# Altium schematic symbol library Diode%.SchLib: 376 symbols (part 6 of 9)
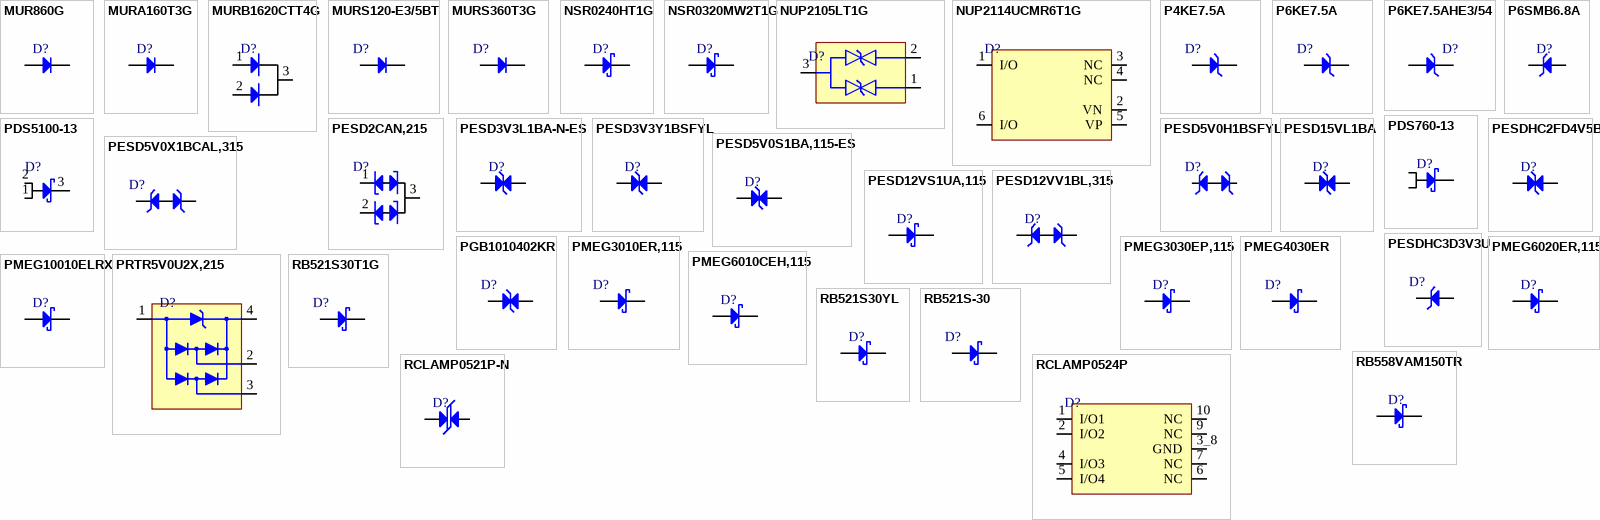
[diagram p14: symbols MUR860G to RCLAMP0524P]

## NUP2114UCMR6T1G
designator D?
TVS DIODE 5VWM 10VC 6TSOP; Manufacturer: onsemi; Manufacturer Part Number: NUP2114UCMR6T1G; Manufacturer Lifecycle Status: ACTIVE; Item Type: TVS Diodes; Breakdown Voltage: 7.5V; Value: 1pF; Clamping Voltage: 12V; Direction: Unidirectional; Element Configuration: Single; ESD Protection: Yes; Leakage Current: 1µA; Max Surge Current: 19A; Min Breakdown Voltage: 6V; Number of Bidirectional Channels: 2; Number of Channels: 1; Operating Supply Voltage: 5V; Peak Pulse Current: 8A; Test Current: 1mA; Supplier: DigiKey; LCSC Part Number: C393373; RoHS: Compliant; Stock: 34630; Pricing: 1=0.81, 10=0.5, 100=0.3234, 500=0.24708, 1000=0.22246 (USD); Case/Package: TSOP; China RoHS: Compliant; Contact Plating: Tin; Depth: 1.5mm; Halogen Free: Halogen Free; Height: 1mm; Lead Free: Lead Free; Length: 3mm; Lifecycle Status: Production; Max Breakdown Voltage: 7.5V; Max Operating Temperature: 125°C; Max Reverse Leakage Current: 1µA; Min Operating Temperature: -40°C; Number of Elements: 1; Number of Lines: 2; Pins: 6; Number of Terminals: 6; Packaging: Tape and Reel; Peak Reverse Current: 1µA; Polarity: Unidirectional; Power Line Protection: Yes; Radiation Hardening: No; REACH SVHC: Yes; Reverse Standoff Voltage: 5V; Schedule B: 8536300000, 8536300000|8536300000|8536300000|8536300000|8536300000|8536300000|8536300000|8536300000|8536300000|8536300000|8536300000|8536300000|8536300000|8536300000|8536300000|8536300000|8536300000|8536300000|8536300000|8536300000|8536300000|8536300000|8536300000|85; Width: 1.7mm; Working Voltage: 5V; ComponentLink1URL: https://datasheet.octopart.com:443/NUP2114UCMR6T1G-onsemi-datasheet-180968601.pdf?src-supplier=IHS; ComponentLink1Description: https://datasheet.octopart.com:443/NUP2114UCMR6T1G-onsemi-datasheet-180968601.pdf?src-supplier=IHS; ComponentLink2URL: https://datasheet.octopart.com:443/NUP2114UCMR6T1G-ON-Semiconductor-datasheet-139013348.pdf?src-supplier=Upverter; ComponentLink2Description: https://datasheet.octopart.com:443/NUP2114UCMR6T1G-ON-Semiconductor-datasheet-139013348.pdf?src-supplier=Upverter; ComponentLink3URL: https://datasheet.octopart.com:443/NUP2114UCMR6T1G-ON-Semiconductor-datasheet-12517220.pdf?src-supplier=JRH+Electronics; ComponentLink3Description: https://datasheet.octopart.com:443/NUP2114UCMR6T1G-ON-Semiconductor-datasheet-12517220.pdf?src-supplier=JRH+Electronics; ComponentLink4URL: https://datasheet.octopart.com:443/NUP2114UCMR6T1G-ON-Semiconductor-datasheet-93402670.pdf?src-supplier=Newark; ComponentLink4Description: https://datasheet.octopart.com:443/NUP2114UCMR6T1G-ON-Semiconductor-datasheet-93402670.pdf?src-supplier=Newark; ComponentLink5URL: https://datasheet.octopart.com:443/NUP2114UCMR6T1G-ON-Semiconductor-datasheet-11781058.pdf?src-supplier=Arrow+Electronics; ComponentLink5Description: https://datasheet.octopart.com:443/NUP2114UCMR6T1G-ON-Semiconductor-datasheet-11781058.pdf?src-supplier=Arrow+Electronics; ComponentLink6URL: http://sigma.octopart.com:80/15540786/rohs_certificate/ON-Semiconductor-NUP2114UCMR6T1G.pdf?src-supplier=Compliance+Statements; ComponentLink6Description: http://sigma.octopart.com:80/15540786/rohs_certificate/ON-Semiconductor-NUP2114UCMR6T1G.pdf?src-supplier=Compliance+Statements; ComponentLink7URL: http://sigma.octopart.com:80/15684254/materials_sheet/ON-Semiconductor-NUP2114UCMR6T1G.csv?src-supplier=Compliance+Statements; ComponentLink7Description: http://sigma.octopart.com:80/15684254/materials_sheet/ON-Semiconductor-NUP2114UCMR6T1G.csv?src-supplier=Compliance+Statements; ComponentLink8URL: http://sigma.octopart.com:80/150629776/rohs_statement/ON-Semiconductor-NUP2114UCMR6T1G.pdf?src-supplier=Compliance+Statements; ComponentLink8Description: http://sigma.octopart.com:80/150629776/rohs_statement/ON-Semiconductor-NUP2114UCMR6T1G.pdf?src-supplier=Compliance+Statements; ComponentLink9URL: http://sigma.octopart.com:80/reach_statement/ON-Semiconductor-company-79.pdf?src-supplier=Compliance+Statements; ComponentLink9Description: http://sigma.octopart.com:80/reach_statement/ON-Semiconductor-company-79.pdf?src-supplier=Compliance+Statements; ComponentLink10URL: https://octopart.com:443/opatz8j6/c1?t=WHQR9uYdgpzj_1pscu76jQl6SgdNYEFCsB45f32wZZoFxCsQNnTKjjNsMYmP8-tNAzH3PllWfDzCrm21sm3O0yX6Z-53NNC5eFJr5XbJGHdORXd5PF3OOo3CImUBKNeQS3HmN9uPOWjBWXFdunIc45LQOJ5gn3633PacQX-_VlsFFggQuFkNQdU_reWhDfM_aJjhbu9NdAkiBle4rEQKmYnaoI-ZpXvRqCCi0hGZ9pE0dY1iMvStjDVJm3RbKYgavDmI8RSqtgWwHOO5VIrlYvErgV0U4ccu7WiifKCK2DwQWrnPYcBzCgFR9XOWz9r3-48fB14U1Lqb5JaFbo5XHNFFjMaufSDK6ZmMxG1n87oH0pc&src-supplier=Compliance+Statements; ComponentLink10Description: https://octopart.com:443/opatz8j6/c1?t=WHQR9uYdgpzj_1pscu76jQl6SgdNYEFCsB45f32wZZoFxCsQNnTKjjNsMYmP8-tNAzH3PllWfDzCrm21sm3O0yX6Z-53NNC5eFJr5XbJGHdORXd5PF3OOo3CImUBKNeQS3HmN9uPOWjBWXFdunIc45LQOJ5gn3633PacQX-_VlsFFggQuFkNQdU_reWhDfM_aJjhbu9NdAkiBle4rEQKmYnaoI-ZpXvRqCCi0hGZ9pE0dY1iMvStjDVJm3RbKYgavDmI8RSqtgWwHOO5VIrlYvErgV0U4ccu7WiifKCK2DwQWrnPYcBzCgFR9XOWz9r3-48fB14U1Lqb5JaFbo5XHNFFjMaufSDK6ZmMxG1n87oH0pc&src-supplier=Compliance+Statements; ComponentLink11URL: https://octopart.com:443/opatz8j6/c1?t=VqVTyc6VXqTBoXsnuoG7LjY3mp2KX-eKzPIkg7aySNunBFpm0IQnkmc826qVFZhglS6vaf-VvqwaWaROfS_iErSVq9YUUuVgokCDv5Vhxq2pu1cn-vrRw1TlcFDaGbodQB-atNY6UP6gD2sOO8NRAoQTemD37mLChF1Rt1bpz95WWhJ_wI0XqbdDN8V1Apvbq8ufNLXwMMdHk5jYglIDCz4WpJf5DoTt1BP_MBv-tXAye_NcKa095654jMt3sjm_6RuC2vVrkcCpfXNjjgvjYPsYUvKBiXeM6Xjzw9honyCE0JlgCVT7WXyyf_6oP9kIrOXlSICGvfIO1US9YbBHujA-CLkGpoYI906K6Xw-TlpUog&src-supplier=Compliance+Statements; ComponentLink11Description: https://octopart.com:443/opatz8j6/c1?t=VqVTyc6VXqTBoXsnuoG7LjY3mp2KX-eKzPIkg7aySNunBFpm0IQnkmc826qVFZhglS6vaf-VvqwaWaROfS_iErSVq9YUUuVgokCDv5Vhxq2pu1cn-vrRw1TlcFDaGbodQB-atNY6UP6gD2sOO8NRAoQTemD37mLChF1Rt1bpz95WWhJ_wI0XqbdDN8V1Apvbq8ufNLXwMMdHk5jYglIDCz4WpJf5DoTt1BP_MBv-tXAye_NcKa095654jMt3sjm_6RuC2vVrkcCpfXNjjgvjYPsYUvKBiXeM6Xjzw9honyCE0JlgCVT7WXyyf_6oP9kIrOXlSICGvfIO1US9YbBHujA-CLkGpoYI906K6Xw-TlpUog&src-supplier=Compliance+Statements
footprint 6-TSOP
pins: 1 I/O, 2 VN, 3 NC, 4 NC, 5 VP, 6 I/O

## P4KE7.5A
designator D?
TVS DO15 6.4V 400W UNIDIR; Manufacturer: Littelfuse; Manufacturer Part Number: P4KE7.5A; Supplier: Digi-Key; Supplier Part Number: P4KE7.5ACT-ND; RoHS: Yes; Category: TVS Diodes; Stock: 4193; Pricing: 1=0.48, 10=0.371, 100=0.2228, 500=0.2063, 1000=0.14028, 2000=0.12914 (USD); ComponentLink1URL: https://datasheet.ciiva.com/342/littelfuse-tvs-diode-p4ke-datasheet-pdf-342184.pdf?src-supplier=Digi-Key; ComponentLink1Description: https://datasheet.ciiva.com/342/littelfuse-tvs-diode-p4ke-datasheet-pdf-342184.pdf?src-supplier=Digi-Key; ComponentLink2URL: https://datasheet.ciiva.com/342/littelfuse-tvs-diode-p4ke-datasheet-pdf-342185.pdf?src-supplier=Digi-Key; ComponentLink2Description: https://datasheet.ciiva.com/342/littelfuse-tvs-diode-p4ke-datasheet-pdf-342185.pdf?src-supplier=Digi-Key; ComponentLink3URL: https://datasheet.ciiva.com/344/littelfuse-tvs-diode-p4ke-datasheet-pdf-344098.pdf?src-supplier=Digi-Key; ComponentLink3Description: https://datasheet.ciiva.com/344/littelfuse-tvs-diode-p4ke-datasheet-pdf-344098.pdf?src-supplier=Digi-Key
footprint P4KE7.5A
pins: 1 K, 2 A

## P6KE7.5A
designator D?
TVS DIODE 6.4VWM 11.3VC DO204AC; Manufacturer: Littelfuse; Manufacturer Part Number: P6KE7.5A; Reverse Voltage: 6.4V; Supplier: Future Electronics; Supplier Part Number: 9017454; RoHS: Yes; Category: TVS Diodes; Stock: 2812; Pricing: 1=0.395, 15=0.325, 100=0.27, 400=0.235, 2000=0.189 (USD); ComponentLink1URL: https://datasheet.ciiva.com/15143/getdatasheetpartid-152329-15143807.pdf?src-supplier=Verical; ComponentLink1Description: https://datasheet.ciiva.com/15143/getdatasheetpartid-152329-15143807.pdf?src-supplier=Verical; ComponentLink2URL: https://datasheet.ciiva.com/331/littelfuse-tvs-diode-p6ke-datasheet-pdf-331007.pdf?src-supplier=Digi-Key; ComponentLink2Description: https://datasheet.ciiva.com/331/littelfuse-tvs-diode-p6ke-datasheet-pdf-331007.pdf?src-supplier=Digi-Key; ComponentLink3URL: https://datasheet.ciiva.com/331/littelfuse-tvs-diode-p6ke-datasheet-pdf-331031.pdf?src-supplier=Digi-Key; ComponentLink3Description: https://datasheet.ciiva.com/331/littelfuse-tvs-diode-p6ke-datasheet-pdf-331031.pdf?src-supplier=Digi-Key; ComponentLink4URL: https://datasheet.ciiva.com/331/littelfuse-tvs-diode-p6ke-datasheet-pdf-331032.pdf?src-supplier=Digi-Key; ComponentLink4Description: https://datasheet.ciiva.com/331/littelfuse-tvs-diode-p6ke-datasheet-pdf-331032.pdf?src-supplier=Digi-Key; ComponentLink5URL: https://datasheet.ciiva.com/4510/littelfuse-tvs-diode-p6ke-48586-4510890.pdf?src-supplier=Mouser; ComponentLink5Description: https://datasheet.ciiva.com/4510/littelfuse-tvs-diode-p6ke-48586-4510890.pdf?src-supplier=Mouser; ComponentLink6URL: https://datasheet.ciiva.com/8062/littelfuse-tvs-diode-p6ke-8062215.pdf?src-supplier=Element14; ComponentLink6Description: https://datasheet.ciiva.com/8062/littelfuse-tvs-diode-p6ke-8062215.pdf?src-supplier=Element14; LCSC Part Number: C1975000; Item Type: Diode
footprint DO-15
pins: 1 K, 2 A

## P6KE7.5AHE3/54
designator D?
TVS DIODE 6.4VWM 11.3VC DO204AC; Reverse Standoff Voltage: 6.4V; Peak Pulse Power: 600W; Min Breakdown Voltage: 7.13V; Peak Pulse Current: 53.1A; Diode Type: ZENER; Number of Unidirectional Channels: 1; Power Line Protection: No; Direction: Unidirectional; Max Surge Current: 100A; Clamping Voltage: 11.3V; Max Reverse Leakage Current: 1uA; Test Current: 1mA; Item Type: TVS Diode; ComponentLink1Description: LCSC; Supplier: Digi-Key; Supplier Part Number: P6KE7.5AHE3/54-ND; RoHS: Yes; Category: TVS Diodes; Pricing: 4000=0.21589, 8000=0.20453, 12000=0.18938, 28000=0.1875 (USD); Mounting Technology: Through Hole; Case/Package: DO-204AC; Pins: 2; Min Operating Temperature: -55°C; Max Operating Temperature: 175°C; Packaging: Tape and Reel; Series: Automotive, AEC-Q101, TransZorb®; Package Quantity: 4000; Operating Supply Voltage: 6.4V; Polarity: Unidirectional; Breakdown Voltage: 7.13V; Number of Channels: 1; Mounting Style: AXIAL; Termination: Axial; RoHS Compliant: Yes; ComponentLink2URL: https://datasheet.ciiva.com/346/p6ke-346272.pdf?src-supplier=Digi-Key; ComponentLink2Description: https://datasheet.ciiva.com/346/p6ke-346272.pdf?src-supplier=Digi-Key; ComponentLink3URL: https://datasheet.ciiva.com/346/p6ke-346468.pdf?src-supplier=Digi-Key; ComponentLink3Description: https://datasheet.ciiva.com/346/p6ke-346468.pdf?src-supplier=Digi-Key
footprint DO-15
pins: 1 K, 2 A

## P6SMB6.8A
designator D?
58.1A 600W 10.5V@58.1A 6.45V Unidirectional 5.8V SMB Electrostatic and Surge Protection (TVS/ESD) ROHS; Manufacturer: BORN; Manufacturer Part Number: P6SMB6.8A; Package: SMB; LCSC Part Number: C5439947; Item Type: TVS/ESD; ComponentLink1Description: LCSC; ComponentLink1URL: https://www.lcsc.com/product-detail/Electrostatic-and-Surge-Protection-TVS-ESD_BORN-P6SMB6-8A_C5439947.html
footprint SMB_
pins: 1 A, 2 C

## PDS760-13
designator D?
DIODE SCHOTTKY 60V 7A POWERDI5; Manufacturer: Diodes; Manufacturer Part Number: PDS760-13; Supplier: Future Electronics; Supplier Part Number: 7738990; RoHS: No; Category: Rectifier Diodes; Stock: 295000; Pricing: 5000=0.31, 10000=0.305, 15000=0.3, 20000=0.3 (USD); Reverse Voltage: 60V; ComponentLink1URL: https://datasheet.ciiva.com/4715/ds30477-62081-4715698.pdf?src-supplier=Mouser; ComponentLink1Description: https://datasheet.ciiva.com/4715/ds30477-62081-4715698.pdf?src-supplier=Mouser; ComponentLink2URL: https://datasheet.ciiva.com/915/ds30477-915170.pdf?src-supplier=Digikey; ComponentLink2Description: https://datasheet.ciiva.com/915/ds30477-915170.pdf?src-supplier=Digikey; ComponentLink3URL: https://datasheet.ciiva.com/16475/ds30477-16475660.pdf?src-supplier=Future+Electronics; ComponentLink3Description: https://datasheet.ciiva.com/16475/ds30477-16475660.pdf?src-supplier=Future+Electronics; ComponentLink4URL: https://datasheet.ciiva.com/7964/ds30477-7964294.pdf?src-supplier=Element14; ComponentLink4Description: https://datasheet.ciiva.com/7964/ds30477-7964294.pdf?src-supplier=Element14; ComponentLink5URL: https://datasheet.ciiva.com/8301/ds30477-8301047.pdf?src-supplier=Avnet; ComponentLink5Description: https://datasheet.ciiva.com/8301/ds30477-8301047.pdf?src-supplier=Avnet; ComponentLink6URL: https://datasheet.ciiva.com/8301/ds30477-8301849.pdf?src-supplier=Avnet; ComponentLink6Description: https://datasheet.ciiva.com/8301/ds30477-8301849.pdf?src-supplier=Avnet; ComponentLink7URL: https://datasheet.ciiva.com/915/ds30477-915171.pdf?src-supplier=Digikey; ComponentLink7Description: https://datasheet.ciiva.com/915/ds30477-915171.pdf?src-supplier=Digikey; ComponentLink8URL: https://datasheet.ciiva.com/915/ds30477-915172.pdf?src-supplier=Digikey; ComponentLink8Description: https://datasheet.ciiva.com/915/ds30477-915172.pdf?src-supplier=Digikey; LCSC Part Number: C96113; Item Type: Diode
footprint Power-DI-5
pins: 1 A, 2 A, 3 K

## PDS5100-13
designator D?
DIODE SCHOTTKY 100V 5A POWERDI5; Manufacturer: Diodes; Manufacturer Part Number: PDS5100-13; Supplier: Future Electronics; Supplier Part Number: 7587892; RoHS: Yes; Item Type: Diode; Stock: 15000; Pricing: 5000=0.51, 10000=0.49 (USD); ComponentLink1URL: https://datasheet.ciiva.com/4715/ds30483-85202-4715621.pdf?src-supplier=Mouser; ComponentLink1Description: https://datasheet.ciiva.com/4715/ds30483-85202-4715621.pdf?src-supplier=Mouser; ComponentLink2URL: https://datasheet.ciiva.com/23710/ds30483-23710529.pdf?src-supplier=Newark; ComponentLink2Description: https://datasheet.ciiva.com/23710/ds30483-23710529.pdf?src-supplier=Newark; ComponentLink3URL: https://datasheet.ciiva.com/8301/ds30483-8301032.pdf?src-supplier=Avnet; ComponentLink3Description: https://datasheet.ciiva.com/8301/ds30483-8301032.pdf?src-supplier=Avnet; ComponentLink4URL: https://datasheet.ciiva.com/8301/ds30483-8301036.pdf?src-supplier=Avnet; ComponentLink4Description: https://datasheet.ciiva.com/8301/ds30483-8301036.pdf?src-supplier=Avnet; ComponentLink5URL: https://datasheet.ciiva.com/915/ds30483-915146.pdf?src-supplier=Digikey; ComponentLink5Description: https://datasheet.ciiva.com/915/ds30483-915146.pdf?src-supplier=Digikey; ComponentLink6URL: https://datasheet.ciiva.com/915/ds30483-915147.pdf?src-supplier=Digikey; ComponentLink6Description: https://datasheet.ciiva.com/915/ds30483-915147.pdf?src-supplier=Digikey; ComponentLink7URL: https://datasheet.ciiva.com/915/ds30483-915148.pdf?src-supplier=Digikey; ComponentLink7Description: https://datasheet.ciiva.com/915/ds30483-915148.pdf?src-supplier=Digikey
footprint Power-DI-5
pins: 1 A, 2 A, 3 K

## PESD2CAN,215
designator D?
TVS DIODE 24VWM 41VC TO236AB; Manufacturer: Nexperia; Manufacturer Part Number: PESD2CAN,215; Supplier 1: Arrow Electronics; RoHS: No; Category: ESD and Circuit Protection ICs; Stock 1: 775; Pricing 1: 1=0.48690, 10=0.40120, 25=0.38650, 50=0.33780, 100=0.25440, 250=0.25380, 500=0.25120 (USD); ComponentLink1URL: http://www.farnell.com/datasheets/1750978.pdf?src-supplier=Farnell; ComponentLink1Description: http://www.farnell.com/datasheets/1750978.pdf?src-supplier=Farnell; ComponentLink2URL: https://assets.nexperia.com/documents/data-sheet/PESD2CAN.pdf?src-supplier=Digi-Key; ComponentLink2Description: https://assets.nexperia.com/documents/data-sheet/PESD2CAN.pdf?src-supplier=Digi-Key; ComponentLink3URL: http://www.farnell.com/datasheets/1750978.pdf?src-supplier=Newark; ComponentLink3Description: http://www.farnell.com/datasheets/1750978.pdf?src-supplier=Newark; Supplier Part Number 1: PESD2CAN,215; LCSC Part Number: C75176
footprint SOT-23 (TRANS NPN 40V 0.6A SOT23)
pins: 1 K1, 2 K2, 3 C_K

## PESD3V3L1BA-N-ES
designator D?
30A 360W 7V 3.5V Bidirectional 3.3V SOD-323 ESD and Surge Protection (TVS/ESD) ROHS; Manufacturer: ElecSuper; Manufacturer Part Number: PESD3V3L1BA-N-ES; Item Type: ESD/TVS; Package: SOD-323; LCSC Part Number: C41409249; ComponentLink1Description: LCSC; ComponentLink1URL: https://www.lcsc.com/product-detail/ESD-and-Surge-Protection-TVS-ESD_ElecSuper-PESD3V3L1BA-N-ES_C41409249.html
footprint SOD-323 (Bi-directional)
pins: 1 A, 2 A

## PESD3V3Y1BSFYL
designator D?
TVS DIODE 3.3VWM 3.7VC DSN0603-2; Manufacturer: Nexperia; Manufacturer Part Number: PESD3V3Y1BSFYL; Item Type: TVS Diodes; Supplier: Future Electronics; Supplier Part Number: 9101291; RoHS: No; Stock: 9000; Pricing: 9000=0.0488, 18000=0.0477, 36000=0.0466, 45000=0.0463, 135000=0.0442 (USD); ComponentLink1URL: http://www.farnell.com/datasheets/2621606.pdf?src-supplier=Farnell; ComponentLink1Description: http://www.farnell.com/datasheets/2621606.pdf?src-supplier=Farnell; ComponentLink2URL: http://www.farnell.com/datasheets/2621606.pdf?src-supplier=Newark; ComponentLink2Description: http://www.farnell.com/datasheets/2621606.pdf?src-supplier=Newark; LCSC Part Number: C552535
footprint DSN0603-2
pins: 1 A, 2 A

## PESD5V0H1BSFYL
designator D?
TVS DIODE 5VWM 6.3VC DSN0603-2; Manufacturer: Nexperia; Manufacturer Part Number: PESD5V0H1BSFYL; Supplier 1: Avnet; RoHS: Yes; Category: ESD and Circuit Protection ICs; Stock 1: 9000; Pricing 1: 18000=0.06453, 36000=0.06278, 54000=0.06104, 90000=0.05930, 180000=0.05755, 900000=0.05581, 1800000=0.05406 (USD); RoHS Compliant: Yes; ComponentLink1URL: http://www.farnell.com/datasheets/1961312.pdf?src-supplier=Farnell; ComponentLink1Description: http://www.farnell.com/datasheets/1961312.pdf?src-supplier=Farnell; ComponentLink2URL: https://assets.nexperia.com/documents/data-sheet/PESD5V0H1BSF.pdf?src-supplier=Digi-Key; ComponentLink2Description: https://assets.nexperia.com/documents/data-sheet/PESD5V0H1BSF.pdf?src-supplier=Digi-Key; ComponentLink3URL: http://www.farnell.com/datasheets/1961312.pdf?src-supplier=Newark; ComponentLink3Description: http://www.farnell.com/datasheets/1961312.pdf?src-supplier=Newark; Supplier Part Number 1: PESD5V0H1BSFYL; LCSC Part Number: C477989; Item Type: Diode
footprint DSN0603-2
pins: 1, 2

## PESD5V0S1BA,115-ES
designator D?
18A 250W 8V 5.5V Bidirectional 5V SOD-323 ESD and Surge Protection (TVS/ESD) ROHS; Manufacturer: ElecSuper; Manufacturer Part Number: PESD5V0S1BA,115-ES; Item Type: ESD/TVS; Package: SOD-323; LCSC Part Number: C41409246; ComponentLink1Description: LCSC; ComponentLink1URL: https://www.lcsc.com/product-detail/ESD-and-Surge-Protection-TVS-ESD_ElecSuper-PESD5V0S1BA-115-ES_C41409246.html
footprint SOD-323 (Bi-directional)
pins: 1 A, 2 A

## PESD5V0X1BCAL,315
designator D?
TVS DIODE 5.5VWM 17VC SOD882; Manufacturer: Nexperia; Manufacturer Part Number: PESD5V0X1BCAL,315; Supplier 1: Avnet; RoHS: Yes; Category: ESD and Circuit Protection ICs; Stock 1: 1519000; Pricing 1: 7463=0.04958, 7500=0.04824, 15000=0.04690, 38000=0.04556, 75000=0.04422, 380000=0.04288, 750000=0.04154 (USD); RoHS Compliant: Yes; ComponentLink1URL: https://assets.nexperia.com/documents/data-sheet/PESD5V0X1BCAL.pdf?src-supplier=Digi-Key; ComponentLink1Description: https://assets.nexperia.com/documents/data-sheet/PESD5V0X1BCAL.pdf?src-supplier=Digi-Key; Supplier Part Number 1: PESD5V0X1BCAL,315; LCSC Part Number: C456151; Item Type: Diode
footprint SOD-882
pins: 1, 2

## PESD12VS1UA,115
designator D?
TVS DIODE 12VWM 27VC SOD323; Manufacturer: Nexperia; Manufacturer Part Number: PESD12VS1UA,115; Supplier 1: Mouser; RoHS: Yes; Category: ESD and Circuit Protection ICs; Stock 1: 44616; Pricing 1: 1=0.47000, 10=0.34800, 50=0.34800, 100=0.19600, 1000=0.10300, 10000=0.07400 (USD); RoHS Compliant: Yes; ComponentLink1URL: http://www.farnell.com/datasheets/1508356.pdf?src-supplier=Farnell; ComponentLink1Description: http://www.farnell.com/datasheets/1508356.pdf?src-supplier=Farnell; Supplier Part Number 1: 771-PESD12S1UA115; LCSC Part Number: C131084; Item Type: TVS Diode
footprint SOD-323
pins: 1 A, 2 K

## PESD12VV1BL,315
designator D?
TVS DIODE 12VWM 38VC DFN1006-2; Manufacturer: Nexperia; Manufacturer Part Number: PESD12VV1BL,315; Polarity: 211Direction; Value: 25pF; Number of Channels: 1NUMBER; Min Breakdown Voltage: 14.6V; Peak Pulse Current: 7.8A; Peak Pulse Power: 290W; Power Line Protection: 5898YesNo; Reverse Standoff Voltage: 12V; Clamping Voltage: 38V; Element Configuration: 5460ElementConfiguration; Leakage Current: 10nA; Supplier: Future Electronics; LCSC Part Number: C111472; RoHS: Yes; Item Type: Diode; Stock: 70000; Pricing: 10000=0.029, 30000=0.028, 40000=0.0277, 100000=0.0269, 150000=0.0261 (USD); Mounting Technology: 8Mount; Case/Package: 111Case; Pins: 2NUMBER; Min Operating Temperature: -55°C; Max Operating Temperature: 150°C; Termination: 4890ConnectorType; Number of Bidirectional Channels: 1NUMBER; Working Voltage: 12V; Direction: 211Direction; Breakdown Voltage: 14.6V; Max Power Dissipation: 290W; Length: 1.02mm; Depth: 620um; Radiation Hardening: 5898YesNo; ComponentLink1URL: http://www.farnell.com/datasheets/2178732.pdf?src-supplier=Farnell; ComponentLink1Description: http://www.farnell.com/datasheets/2178732.pdf?src-supplier=Farnell; ComponentLink2URL: https://assets.nexperia.com/documents/data-sheet/PESD12VV1BL.pdf?src-supplier=Digikey; ComponentLink2Description: https://assets.nexperia.com/documents/data-sheet/PESD12VV1BL.pdf?src-supplier=Digikey
footprint DFN1006-2L (Bi-Directional)
pins: 1, 2

## PESD15VL1BA
designator D?
18A 5V 4V Bi-Directional 5V SOD-323 Electrostatic and Surge Protection (TVS/ESD) ROHS; Manufacturer: HXY MOSFET; Manufacturer Part Number: PESD15VL1BA; Package: SOD-323; LCSC Part Number: C5337178; Item Type: TVS/ESD; ComponentLink1Description: LCSC; ComponentLink1URL: https://www.lcsc.com/product-detail/Electrostatic-and-Surge-Protection-TVS-ESD_HXY-MOSFET-PESD15VL1BA_C5337178.html
footprint SOD-323 (Bi-directional)
pins: 1 A, 2 A

## PESDHC2FD4V5B
designator D?
12V 30A 4.5V Bi-Directional DFN1006 ESD Protection Devices ROHS; Manufacturer: Shanghai Prisemi Elec; Manufacturer Part Number: PESDHC2FD4V5B; Item Type: Diode; Package: DFN1006; LCSC Part Number: C110686; ComponentLink1Description: LCSC; ComponentLink1URL: https://www.lcsc.com/product-detail/ESD-Protection-Devices_Shanghai-Prisemi-Elec-PESDHC2FD4V5B_C110686.html
footprint DFN1006-2L_
pins: 1 A, 2 A

## PESDHC3D3V3U
designator D?
15A@8/20us 9V 5V 3.3V Unidirectional SOD-323 TVS ROHS; Manufacturer: Shanghai Prisemi Elec; Manufacturer Part Number: PESDHC3D3V3U; Item Type: Diode; Package: SOD-323; LCSC Part Number: C496538; ComponentLink1Description: LCSC; ComponentLink1URL: https://www.lcsc.com/product-detail/TVS_Shanghai-Prisemi-Elec-PESDHC3D3V3U_C496538.html
footprint SOD-323
pins: 1 C, 2 A

## PGB1010402KR
designator D?
TVS DIODE 12VWM 250VC 0402; Manufacturer: Littelfuse; Manufacturer Part Number: PGB1010402KR; Direction: Bidirectional; Capacitance: 0.04pF; Number of Channels: 1; Reverse Standoff Voltage: 12V; Clamping Voltage: 250V; Power Line Protection: No; Leakage Current: 1nA; Element Configuration: Single; Diode Type: ZENER; Response Time: 1ns; Supplier 1: Arrow Electronics; RoHS: Yes; Category: TVS Diodes; Stock 1: 30000; Pricing 1: 10000=0.23580, 20000=0.23350, 30000=0.23120, 40000=0.22890, 50000=0.21590, 100000=0.20590 (USD); Mount: Surface Mount; Case/Package: 0402; Number of Pins: 2; Case Code (Metric): 1005; Case Code (Imperial): 0402; Min Operating Temperature: -65°C; Max Operating Temperature: 125°C; Packaging: Cut Tape; Number of Bidirectional Channels: 1; Termination: SMD/SMT; Working Voltage: 12V; Operating Supply Voltage: 12V; Resistor Type: Zener; Series: PulseGuard® PGB; Voltage Rating: 12V; Polarity: Bidirectional; Number of Elements: 1; Voltage Rating (DC): 12V; Length: 1.66mm; Height: 0.31mm; Depth: 0.51mm; Radiation Hardening: No; Lead Free: Lead Free; RoHS Compliant: Yes; Reach SVHC Compliant: Yes; ComponentLink1URL: https://datasheet.ciiva.com/1268/1486684-1268416.pdf?src-supplier=Element14; ComponentLink1Description: https://datasheet.ciiva.com/1268/1486684-1268416.pdf?src-supplier=Element14; ComponentLink2URL: https://datasheet.ciiva.com/5837/575761-5837954.pdf?src-supplier=Farnell; ComponentLink2Description: https://datasheet.ciiva.com/5837/575761-5837954.pdf?src-supplier=Farnell; ComponentLink3URL: https://datasheet.ciiva.com/11804/0900766b80f9ec73-11804302.pdf?src-supplier=RSComponents; ComponentLink3Description: https://datasheet.ciiva.com/11804/0900766b80f9ec73-11804302.pdf?src-supplier=RSComponents; ComponentLink4URL: https://datasheet.ciiva.com/1268/575761-1268268.pdf?src-supplier=Element14; ComponentLink4Description: https://datasheet.ciiva.com/1268/575761-1268268.pdf?src-supplier=Element14; ComponentLink5URL: https://datasheet.ciiva.com/331/littelfuse-pulseguard-esd-pgb1-331746.pdf?src-supplier=Digi-Key; ComponentLink5Description: https://datasheet.ciiva.com/331/littelfuse-pulseguard-esd-pgb1-331746.pdf?src-supplier=Digi-Key; ComponentLink6URL: https://datasheet.ciiva.com/331/littelfuse-pulseguard-esd-pgb1-331747.pdf?src-supplier=Digi-Key; ComponentLink6Description: https://datasheet.ciiva.com/331/littelfuse-pulseguard-esd-pgb1-331747.pdf?src-supplier=Digi-Key; ComponentLink7URL: https://datasheet.ciiva.com/331/littelfuse-pulseguard-esd-pgb1-331745.pdf?src-supplier=Digi-Key; ComponentLink7Description: https://datasheet.ciiva.com/331/littelfuse-pulseguard-esd-pgb1-331745.pdf?src-supplier=Digi-Key; ComponentLink8URL: https://datasheet.ciiva.com/26917/getdatasheetpartid-250436-26917930.pdf?src-supplier=Verical; ComponentLink8Description: https://datasheet.ciiva.com/26917/getdatasheetpartid-250436-26917930.pdf?src-supplier=Verical; Supplier Part Number 1: PGB1010402KR; LCSC Part Number: C10676; Item Type: Diode
footprint Diode 0402
pins: 1 A, 2 A

## PMEG3010ER,115
designator D?
DIODE SCHOTTKY 30V 1A SOD123W; Manufacturer: Nexperia; Manufacturer Part Number: PMEG3010ER,115; Supplier 1: Digi-Key; Stock 1: 72983; Pricing 1: 1=0.35, 10=0.282, 25=0.258, 100=0.162, 250=0.1602, 500=0.15, 1000=0.102 (USD); Supplier Part Number 1: 1727-5201-1-ND; LCSC Part Number: C456106
footprint SOD-123W (DIODE SCHOTTKY 30V 1A SOD123W)
pins: 1 A, 2 K

## PMEG3030EP,115
designator D?
DIODE SCHOTTKY 30V 3A SOD128; Manufacturer: Nexperia; Manufacturer Part Number: PMEG3030EP,115; Item Type: Diodes; Peak Non-Repetitive Surge Current: 50A; Max Reverse Current: 5mA; Value: 470pF; Power Dissipation: 625mW; Element Configuration: 5460ElementConfiguration; Forward Voltage: 360mV; Supplier: Future Electronics; LCSC Part Number: C255587; RoHS: Yes; Stock: 279000; Pricing: 3000=0.111, 6000=0.109, 9000=0.108, 15000=0.106 (USD); Mounting Technology: 8Mount; Pins: 2NUMBER; Min Operating Temperature: -55°C; Max Operating Temperature: 150°C; Max Repetitive Reverse Voltage (Vrrm): 30V; Max Reverse Voltage (DC): 30V; Average Rectified Current: 3A; Forward Current: 3A; Max Forward Surge Current (Ifsm): 50A; Max Surge Current: 50A; Reverse Voltage: 30V; Height: 1.1mm; Radiation Hardening: 5898YesNo; Lead Free: 5697LeadFree; RoHS Compliant: Yes; ComponentLink1URL: http://www.farnell.com/datasheets/609322.pdf?src-supplier=Farnell; ComponentLink1Description: http://www.farnell.com/datasheets/609322.pdf?src-supplier=Farnell; ComponentLink2URL: https://assets.nexperia.com/documents/data-sheet/PMEG3030EP.pdf?src-supplier=Digikey; ComponentLink2Description: https://assets.nexperia.com/documents/data-sheet/PMEG3030EP.pdf?src-supplier=Digikey; ComponentLink3URL: https://datasheet.octopart.com/PMEG3030EP%2C115-Nexperia-datasheet-115885221.pdf?src-supplier=Newark; ComponentLink3Description: https://datasheet.octopart.com/PMEG3030EP%2C115-Nexperia-datasheet-115885221.pdf?src-supplier=Newark
footprint SOD-128
pins: 1 K, 2 A

## PMEG4030ER
designator D?
SOD-123FL Schottky Barrier Diodes (SBD) ROHS; Manufacturer: Shikues; Manufacturer Part Number: PMEG4030ER; Item Type: Diode; Package: SOD-123FL; LCSC Part Number: C5366303; ComponentLink1Description: LCSC; ComponentLink1URL: https://www.lcsc.com/product-detail/Schottky-Barrier-Diodes-SBD_Shikues-PMEG4030ER_C5366303.html
footprint SOD-123FL
pins: 1 K, 2 A

## PMEG6010CEH,115
designator D?
DIODE SCHOTTKY 60V 1A SOD123F; Manufacturer: Nexperia; Manufacturer Part Number: PMEG6010CEH,115; Forward Voltage: 660mV; Max Forward Surge Current (Ifsm): 9A; Max Reverse Current: 11uA; Supplier: Future Electronics; LCSC Part Number: C110797; RoHS: Yes; Item Type: Diode; Stock: 1479000; Pricing: 3000=0.0496, 9000=0.0477, 12000=0.0472, 30000=0.0457, 45000=0.0442 (USD); Pins: 2NUMBER; Forward Current: 1A; Reverse Voltage: 60V; Height: 1.2mm; RoHS Compliant: Yes; ComponentLink1URL: http://www.farnell.com/datasheets/109684.pdf?src-supplier=Farnell; ComponentLink1Description: http://www.farnell.com/datasheets/109684.pdf?src-supplier=Farnell; ComponentLink2URL: https://www.mouser.com/ds/2/302/PMEG6010CEH_PMEG6010CEJ-102368.pdf?src-supplier=Mouser; ComponentLink2Description: https://www.mouser.com/ds/2/302/PMEG6010CEH_PMEG6010CEJ-102368.pdf?src-supplier=Mouser; ComponentLink3URL: https://assets.nexperia.com/documents/data-sheet/PMEG6010CEH_PMEG6010CEJ.pdf?src-supplier=Digikey; ComponentLink3Description: https://assets.nexperia.com/documents/data-sheet/PMEG6010CEH_PMEG6010CEJ.pdf?src-supplier=Digikey; ComponentLink4URL: https://datasheet.octopart.com/PMEG6010CEH%2C115-Nexperia-datasheet-5311920.pdf?src-supplier=Newark; ComponentLink4Description: https://datasheet.octopart.com/PMEG6010CEH%2C115-Nexperia-datasheet-5311920.pdf?src-supplier=Newark; ComponentLink5URL: https://datasheet.octopart.com/PMEG6010CEH%2C115-Nexperia-datasheet-81455717.pdf?src-supplier=TME; ComponentLink5Description: https://datasheet.octopart.com/PMEG6010CEH%2C115-Nexperia-datasheet-81455717.pdf?src-supplier=TME
footprint SOD-123F
pins: 1 K, 2 A

## PMEG6020ER,115
designator D?
DIODE SCHOTTKY 60V 2A SOD123W; Manufacturer: Nexperia; Manufacturer Part Number: PMEG6020ER,115; Item Type: Diodes; Max Reverse Current: 2.5uA; Value: 240pF; Max Forward Surge Current (Ifsm): 50A; Supplier: Future Electronics; LCSC Part Number: C98663; RoHS: Yes; Stock: 6000; Pricing: 3000=0.058, 6000=0.057, 9000=0.0565, 15000=0.0558, 30000=0.0543 (USD); Pins: 2NUMBER; Max Operating Temperature: 150°C; Forward Current: 2A; Reverse Voltage: 60V; Height: 1.1mm; RoHS Compliant: Yes; ComponentLink1URL: http://www.farnell.com/datasheets/609333.pdf?src-supplier=Farnell; ComponentLink1Description: http://www.farnell.com/datasheets/609333.pdf?src-supplier=Farnell; ComponentLink2URL: https://assets.nexperia.com/documents/data-sheet/PMEG6020ER.pdf?src-supplier=Digikey; ComponentLink2Description: https://assets.nexperia.com/documents/data-sheet/PMEG6020ER.pdf?src-supplier=Digikey; ComponentLink3URL: https://datasheet.octopart.com/PMEG6020ER%2C115-Nexperia-datasheet-8825633.pdf?src-supplier=Newark; ComponentLink3Description: https://datasheet.octopart.com/PMEG6020ER%2C115-Nexperia-datasheet-8825633.pdf?src-supplier=Newark; ComponentLink4URL: http://www.farnell.com/datasheets/609333.pdf?src-supplier=Newark; ComponentLink4Description: http://www.farnell.com/datasheets/609333.pdf?src-supplier=Newark; ComponentLink5URL: https://datasheet.octopart.com/PMEG6020ER%2C115-Nexperia-datasheet-81455721.pdf?src-supplier=TME; ComponentLink5Description: https://datasheet.octopart.com/PMEG6020ER%2C115-Nexperia-datasheet-81455721.pdf?src-supplier=TME
footprint SOD-123W (DIODE SCHOTTKY 30V 1A SOD123W)
pins: 1 A, 2 K

## PMEG10010ELRX
designator D?
DIODE SCHOTTKY 100V 1A SOD123W; Manufacturer: Nexperia; Manufacturer Part Number: PMEG10010ELRX; Item Type: Schottky Diodes; Reverse Recovery Time: 3.7ns; Value: 28pF; Max Forward Surge Current (Ifsm): 50A; Max Reverse Current: 150nA; Supplier: Future Electronics; LCSC Part Number: C179426; RoHS: Yes; Stock: 282000; Pricing: 3000=0.0482, 9000=0.047, 15000=0.0464, 30000=0.0457, 60000=0.0446 (USD); Mounting Technology: 8Mount; Average Rectified Current: 1A; Max Reverse Voltage (DC): 100V; Forward Current: 1A; Reverse Voltage: 100V; Height: 1.1mm; RoHS Compliant: Yes; Lead Free: 5697LeadFree; Reach SVHC Compliant: 4186SVHC; ComponentLink1URL: http://www.farnell.com/datasheets/2170364.pdf?src-supplier=Farnell; ComponentLink1Description: http://www.farnell.com/datasheets/2170364.pdf?src-supplier=Farnell; ComponentLink2URL: https://assets.nexperia.com/documents/data-sheet/PMEG10010ELR.pdf?src-supplier=Digikey; ComponentLink2Description: https://assets.nexperia.com/documents/data-sheet/PMEG10010ELR.pdf?src-supplier=Digikey; ComponentLink3URL: https://datasheet.octopart.com/PMEG10010ELRX-Nexperia-datasheet-67796196.pdf?src-supplier=Future+Electronics; ComponentLink3Description: https://datasheet.octopart.com/PMEG10010ELRX-Nexperia-datasheet-67796196.pdf?src-supplier=Future+Electronics; ComponentLink4URL: http://www.farnell.com/datasheets/2170364.pdf?src-supplier=Newark; ComponentLink4Description: http://www.farnell.com/datasheets/2170364.pdf?src-supplier=Newark
footprint SOD-123W (DIODE SCHOTTKY 30V 1A SOD123W)
pins: 1 A, 2 K

## PRTR5V0U2X,215
designator D?
TVS DIODE 5.5VWM SOT143B; Manufacturer: Nexperia; Manufacturer Part Number: PRTR5V0U2X,215; Item Type: (TVS/ESD); Direction: 211Direction; Reverse Standoff Voltage: 5.5V; Breakdown Voltage: 6V; Value: 1pF; Number of Channels: 2NUMBER; Operating Supply Voltage: 700mV; Supplier: Future Electronics; LCSC Part Number: C12333; RoHS: Yes; Stock: 108000; Pricing: 3000=0.113, 6000=0.111, 12000=0.109, 15000=0.108, 45000=0.104 (USD); Pins: 4NUMBER; Height: 1.1mm; RoHS Compliant: Yes; ComponentLink1URL: http://www.farnell.com/datasheets/109718.pdf?src-supplier=Farnell; ComponentLink1Description: http://www.farnell.com/datasheets/109718.pdf?src-supplier=Farnell; ComponentLink2URL: https://datasheet.octopart.com/PRTR5V0U2X%2C215-Nexperia-datasheet-5405949.pdf?src-supplier=Element14; ComponentLink2Description: https://datasheet.octopart.com/PRTR5V0U2X%2C215-Nexperia-datasheet-5405949.pdf?src-supplier=Element14; ComponentLink3URL: https://assets.nexperia.com/documents/data-sheet/PRTR5V0U2X.pdf?src-supplier=Digikey; ComponentLink3Description: https://assets.nexperia.com/documents/data-sheet/PRTR5V0U2X.pdf?src-supplier=Digikey; ComponentLink4URL: http://www.farnell.com/datasheets/109718.pdf?src-supplier=Newark; ComponentLink4Description: http://www.farnell.com/datasheets/109718.pdf?src-supplier=Newark
footprint SOT-143-4_
pins: 1 P$1, 2 P$2, 3 P$3, 4 P$4

## RB521S30T1G
designator D?
DIODE SCHOTTKY 30V 200MA SOD523; Manufacturer: ON Semiconductor; Manufacturer Part Number: RB521S30T1G; Element Configuration: Single; Max Surge Current: 1A; Max Reverse Current: 30uA; Forward Voltage: 500mV; Power Dissipation: 200mW; Polarity: Standard; Supplier: Future Electronics; Supplier Part Number: 4067781; RoHS: Yes; Category: Rectifier Diodes; Stock: 156000; Pricing: 3000=0.0165, 12000=0.0158, 45000=0.0151, 90000=0.0148, 225000=0.0141 (USD); Case/Package: SOD-523-2; Pins: 2; Min Operating Temperature: -55°C; Max Operating Temperature: 125°C; Forward Current: 200mA; Max Repetitive Reverse Voltage (Vrrm): 30V; Package Quantity: 1; Packaging: Tape and Reel; Average Rectified Current: 200mA; Max Reverse Leakage Current: 30uA; Peak Non-Repetitive Surge Current: 1A; Max Forward Surge Current (Ifsm): 1A; Voltage Rating (DC): 30V; Current Rating: 200mA; Output Current: 200mA; Max Reverse Voltage (DC): 30V; Series: -; Length: 1.3mm; Width: 0.9mm; Height: 0.7mm; Radiation Hardening: No; RoHS Compliant: Yes; Reach SVHC Compliant: No; Lead Free: Lead Free; ComponentLink1URL: http://www.farnell.com/datasheets/2354099.pdf?src-supplier=Newark; ComponentLink1Description: http://www.farnell.com/datasheets/2354099.pdf?src-supplier=Newark; LCSC Part Number: C145179; Item Type: Diode
footprint SOD-523 (SOD-523 Schottky Barrier Diodes (SBD) ROHS)
pins: 1 A, 2 K

## RB521S30YL
designator D?
DIODE SCHOTTKY 30V 200MA SOD523; Manufacturer: Nexperia; Manufacturer Part Number: RB521S30YL; Supplier: Digikey; LCSC Part Number: C553812; RoHS: No; Stock: 7640; Pricing: 1=0.23, 10=0.16, 100=0.0782, 500=0.06524, 1000=0.04533, 2000=0.03929 (USD); Item Type: Diode
footprint SOD-523 (SOD-523 Schottky Barrier Diodes (SBD) ROHS)
pins: 1 A, 2 K

## RB521S-30
designator D?
30V 500mV@200mA 200mA SOD-523 Schottky Barrier Diodes (SBD) ROHS; Manufacturer: Jiangsu Changjing Electronics; Manufacturer Part Number: RB521S-30; Item Type: Diode; Package: SOD-523; LCSC Part Number: C8523; ComponentLink1Description: LCSC; ComponentLink1URL: https://www.lcsc.com/product-detail/Schottky-Barrier-Diodes-SBD_Jiangsu-Changjing-Electronics-Technology-Co-Ltd-RB521S-30_C8523.html
footprint SOD-523 (SOD-523 Schottky Barrier Diodes (SBD) ROHS)
pins: 1 A, 2 K

## RB558VAM150TR
designator D?
Diode Schottky 150V 500mA 2-Pin SOD-323HE Emboss T/R; Manufacturer: Rohm; Manufacturer Part Number: RB558VAM150TR; Item Type: Schottky Barrier Diodes; Supplier: Digi-Key; Supplier Part Number: 846-RB558VAM150TR-ND; RoHS: Yes; Category: Schottky Diodes; Stock: 30000; Pricing: 3000=0.07231, 6000=0.06914, 9000=0.05979, 30000=0.05867, 75000=0.04858, 150000=0.04783 (USD); Mounting Technology: Surface Mount; Case/Package: SMD/SMT; Series: *; Average Rectified Current: 500mA; Max Reverse Voltage (DC): 150V; RoHS Compliant: Yes; LCSC Part Number: C5336764
footprint SOD-323HE
pins: 1 K, 2 A

## RCLAMP0521P-N
designator D?
3.5A@8/20us 16V 6V 5V 0402 ESD and Surge Protection (TVS/ESD) ROHS; Manufacturer: BORN; Manufacturer Part Number: RCLAMP0521P-N; Package: 0402; LCSC Part Number: C316043; Item Type: (TVS/ESD); ComponentLink1Description: LCSC; ComponentLink1URL: https://www.lcsc.com/product-detail/ESD-and-Surge-Protection-span-style-background-color-ff0-TVS-span-ESD_BORN-RCLAMP0521P-N_C316043.html
footprint Bidirectional 0402
pins: 1, 2

## RCLAMP0524P
designator D?
DFN-10(1x2.5) ESD Protection Devices ROHS; Manufacturer: TECH PUBLIC; Manufacturer Part Number: RCLAMP0524P; Package: DFN-10(1x2.5); LCSC Part Number: C907837; Item Type: ESD Protection; ComponentLink1Description: LCSC; ComponentLink1URL: https://www.lcsc.com/product-detail/ESD-Protection-Devices_TECH-PUBLIC-RCLAMP0524P_C907837.html
footprint DFN2510-10L_
pins: 1 I/O1, 2 I/O2, 3_8 GND, 4 I/O3, 5 I/O4, 6 NC, 7 NC, 9 NC, 10 NC

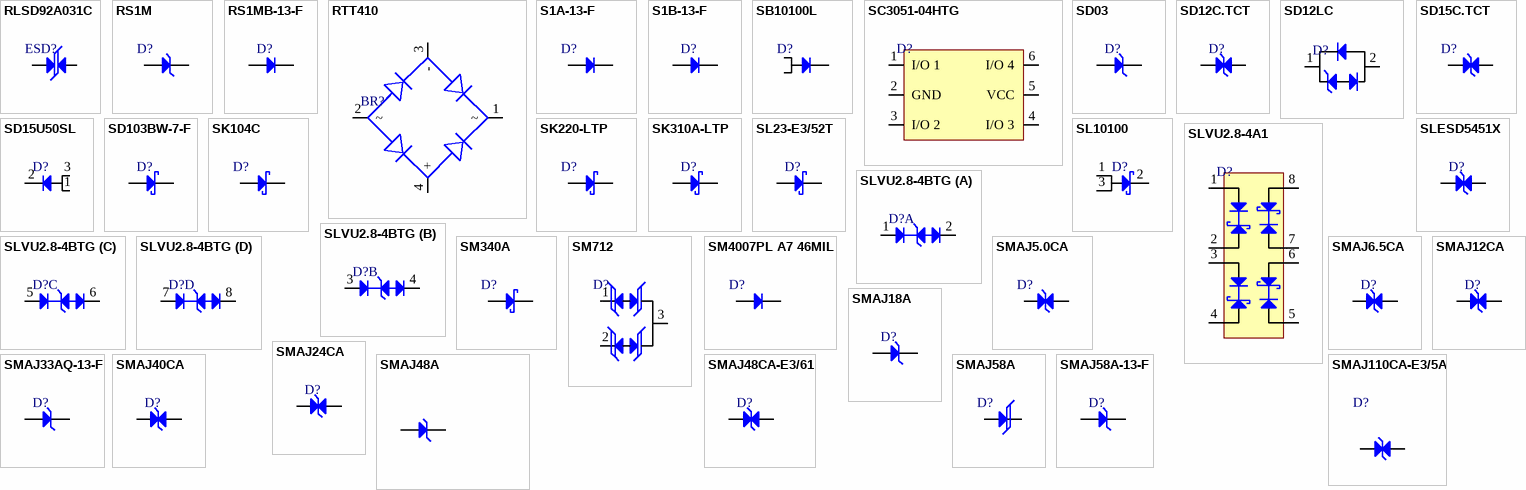
[diagram p6: symbols RLSD92A031C to SMAJ110CA-E3/5A]

## RLSD92A031C
designator ESD?
Bidirectional 3.3V 10V 1A SOD-923 ESD Protection Devices RoHS; Manufacturer: RUILON(Shenzhen Ruilongyuan Elec); Manufacturer Part Number: RLSD92A031C; Package: SOD-923; Polarity: Bidirectional; Voltage - Reverse Standoff (Typ): 3.3V; Voltage - Clamping (Max) @ Ipp: 10V; Current - Peak Pulse (10/1000μs): 1A; LCSC Part Number: C20730
footprint SOD-923.
pins: 1, 2

## RS1M
designator D?
1.3V@1A 500ns Single 1A 1kV SMA Diodes - Fast Recovery Rectifiers ROHS; Manufacturer: MDD; Manufacturer Part Number: RS1M; Item Type: Diode; Package: SMA; LCSC Part Number: C412436; ComponentLink1Description: LCSC; ComponentLink1URL: https://www.lcsc.com/product-detail/Diodes-Fast-Recovery-Rectifiers_MDD-Microdiode-Electronics-RS1M_C412436.html
footprint SMA
pins: 1 K, 2 A

## RS1MB-13-F
designator D?
DIODE GEN PURP 1KV 1A SMB; Manufacturer: Diodes; Manufacturer Part Number: RS1MB-13-F; Max Reverse Current: 5uA; Reverse Recovery Time: 500ns; Peak Non-Repetitive Surge Current: 30A; Forward Voltage: 1.3V; Polarity: Standard; Value: 15pF; Supplier: Future Electronics; LCSC Part Number: C154864; RoHS: Yes; Item Type: Diodes; Stock: 45000; Pricing: 3000=0.0825, 6000=0.093, 9000=0.0794, 12000=0.0905, 15000=0.078, 30000=0.0761, 60000=0.0732 (USD); Mounting Technology: Surface Mount; Case/Package: SMB; Pins: 2; Weight: 0.00328oz; Min Operating Temperature: -65°C; Max Operating Temperature: 150°C; Package Quantity: 3000; Packaging: Tape and Reel; Forward Current: 1A; Max Repetitive Reverse Voltage (Vrrm): 1kV; Output Current: 1A; Series: -; Max Surge Current: 30A; Recovery Time: 500ns; Reverse Voltage (DC): 1kV; Average Rectified Current: 1A; Voltage Rating (DC): 1kV; Current Rating: 1A; Max Reverse Voltage (DC): 1kV; Reverse Recovery Time-Max: 500ns; Length: 4.57mm; Width: 3.94mm; Height: 2.42mm; Radiation Hardening: No; Lead Free: Lead Free; RoHS Compliant: Yes; ComponentLink1URL: https://datasheet.ciiva.com/8301/ds15002-8301721.pdf?src-supplier=Avnet; ComponentLink1Description: https://datasheet.ciiva.com/8301/ds15002-8301721.pdf?src-supplier=Avnet; ComponentLink2URL: https://datasheet.ciiva.com/26818/getdatasheetpartid-91887-26818092.pdf?src-supplier=Verical; ComponentLink2Description: https://datasheet.ciiva.com/26818/getdatasheetpartid-91887-26818092.pdf?src-supplier=Verical; ComponentLink3URL: https://datasheet.ciiva.com/8301/ds15002-8301350.pdf?src-supplier=Avnet; ComponentLink3Description: https://datasheet.ciiva.com/8301/ds15002-8301350.pdf?src-supplier=Avnet
footprint SMB_
pins: 1 A, 2 K

## RTT410
designator BR?
RAPID GPP RECTIFIER TT T&R 1.5K; Manufacturer: Diodes Incorporated; Manufacturer Part Number: RTT410; Item Type: Bridge Rectifier; Package: 4-SMD, Gull Wing; LCSC Part Number: -; ComponentLink1Description: LCSC; ComponentLink1URL: *
footprint RTT410
pins: 1 ~, 2 ~, 3 -, 4 +

## S1A-13-F
designator D?
Diode Switching 50V 1A 2-Pin SMA T/R; Manufacturer: Diodes; Manufacturer Part Number: S1A-13-F; Element Configuration: Single; Reverse Recovery Time: 3us; Peak Non-Repetitive Surge Current: 30A; Max Reverse Current: 5uA; Forward Voltage: 1.1V; Recovery Time: 1.8us; Polarity: Standard; Capacitance: 10pF; ComponentLink1URL: http://www.mouser.com/ds/2/115/ds16008-60440.pdf?src-supplier=Mouser; ComponentLink1Description: http://www.mouser.com/ds/2/115/ds16008-60440.pdf?src-supplier=Mouser; ComponentLink2URL: http://www.diodes.com///datasheets/ds16008.pdf?src-supplier=Avnet; ComponentLink2Description: http://www.diodes.com///datasheets/ds16008.pdf?src-supplier=Avnet; ComponentLink3URL: http://www.te.com/commerce/DocumentDelivery/DDEController?Action=showdoc&DocId=Data+Sheet%7FRPII%2F2%7F0415%7Fpdf%7FEnglish%7FENG_DS_RPIIX2_0415.pdf&src-supplier=Digi-Key; ComponentLink3Description: http://www.te.com/commerce/DocumentDelivery/DDEController?Action=showdoc&DocId=Data+Sheet%7FRPII%2F2%7F0415%7Fpdf%7FEnglish%7FENG_DS_RPIIX2_0415.pdf&src-supplier=Digi-Key; ComponentLink4URL: https://www.diodes.com/assets/Datasheets/ds16008.pdf?src-supplier=Digi-Key; ComponentLink4Description: https://www.diodes.com/assets/Datasheets/ds16008.pdf?src-supplier=Digi-Key; Supplier 1: Digi-Key; RoHS: Yes; Category: Rectifier Diodes; Stock 1: 647079; Pricing 1: 1=0.26000, 10=0.21300, 100=0.11290, 500=0.07424, 1000=0.05049, 2000=0.04554 (USD); Mount: Surface Mount; Case/Package: SMA; Number of Pins: 2; Weight: 0.002258oz; Min Operating Temperature: -65°C; Max Operating Temperature: 150°C; Forward Current: 1A; Max Repetitive Reverse Voltage (Vrrm): 50V; Packaging: Tape and Reel; Package Quantity: 5000; Max Surge Current: 30A; Reverse Voltage (DC): 50V; Average Rectified Current: 1A; Voltage Rating (DC): 50V; Current Rating: 1A; Output Current: 1A; Max Reverse Voltage (DC): 50V; Max Forward Surge Current (Ifsm): 30A; Termination: SMD/SMT; Series: -; Length: 4.6mm; Width: 2.92mm; Height: 2.1mm; Radiation Hardening: No; Lead Free: Lead Free; REACH SVHC: No SVHC; RoHS Compliant: Yes; ComponentLink5URL: https://datasheet.ciiva.com/911/ds16003-911872.pdf?src-supplier=Digi-Key; ComponentLink5Description: https://datasheet.ciiva.com/911/ds16003-911872.pdf?src-supplier=Digi-Key; ComponentLink6URL: https://datasheet.ciiva.com/27052/1541520-27052419.pdf?src-supplier=Jameco; ComponentLink6Description: https://datasheet.ciiva.com/27052/1541520-27052419.pdf?src-supplier=Jameco; ComponentLink7URL: https://datasheet.ciiva.com/22695/1911706-22695830.pdf?src-supplier=Element14; ComponentLink7Description: https://datasheet.ciiva.com/22695/1911706-22695830.pdf?src-supplier=Element14; ComponentLink8URL: https://datasheet.ciiva.com/16199/ds16003-16199336.pdf?src-supplier=Future+Electronics; ComponentLink8Description: https://datasheet.ciiva.com/16199/ds16003-16199336.pdf?src-supplier=Future+Electronics; ComponentLink9URL: https://datasheet.ciiva.com/4453/ds16003-83672-4453580.pdf?src-supplier=Mouser; ComponentLink9Description: https://datasheet.ciiva.com/4453/ds16003-83672-4453580.pdf?src-supplier=Mouser; ComponentLink10URL: https://datasheet.ciiva.com/25953/ds16003-25953033.pdf?src-supplier=Avnet+Europe; ComponentLink10Description: https://datasheet.ciiva.com/25953/ds16003-25953033.pdf?src-supplier=Avnet+Europe; ComponentLink11URL: https://datasheet.ciiva.com/8301/ds16003-8301429.pdf?src-supplier=Avnet; ComponentLink11Description: https://datasheet.ciiva.com/8301/ds16003-8301429.pdf?src-supplier=Avnet; Supplier Part Number 1: S1A-FDICT-ND; LCSC Part Number: C150735
footprint SMA
pins: 1 K, 2 A

## S1B-13-F
designator D?
DIODE STANDARD 100V 1A SMA; Manufacturer: Diodes; Manufacturer Part Number: S1B-13-F; Supplier: Future Electronics; LCSC Part Number: C156295; RoHS: Yes; Item Type: Diodes; Stock: 350000; Pricing: 5000=0.0176, 15000=0.0172, 25000=0.017, 100000=0.0165, 150000=0.0162 (USD); ComponentLink1URL: https://datasheet.ciiva.com/911/ds16003-911864.pdf?src-supplier=Digikey; ComponentLink1Description: https://datasheet.ciiva.com/911/ds16003-911864.pdf?src-supplier=Digikey; ComponentLink2URL: https://datasheet.ciiva.com/911/ds16003-911865.pdf?src-supplier=Digikey; ComponentLink2Description: https://datasheet.ciiva.com/911/ds16003-911865.pdf?src-supplier=Digikey; ComponentLink3URL: https://datasheet.ciiva.com/911/ds16003-911866.pdf?src-supplier=Digikey; ComponentLink3Description: https://datasheet.ciiva.com/911/ds16003-911866.pdf?src-supplier=Digikey
footprint SMA(DO-214AC)
pins: 1 K, 2 A

## SB10100L
designator D?
TO-277 Schottky Barrier Diodes (SBD) ROHS; Manufacturer: TWGMC; Manufacturer Part Number: SB10100L; Item type: Diode; Package: TO-277; ComponentLink1Description: LCSC; ComponentLink1URL: https://www.lcsc.com/product-detail/Schottky-Barrier-Diodes-SBD_TWGMC-SB10100L_C5240369.html; LCSC Part Number: C5240369
footprint SB10100L
pins: 1 A, 2 A, 3 K

## SC3051-04HTG
designator D?
TVS DIODE 6VWM 17VC SOT236; Manufacturer: Littelfuse; Manufacturer Part Number: SC3051-04HTG; Item Type: TVS Diodes; Breakdown Voltage: 8.5V; Clamping Voltage: 17V; Max Breakdown Voltage: 10V; Min Breakdown Voltage: 7V; Number of Elements: 1; Peak Pulse Power: 374W; Peak Reverse Current: 500nA; Polarity: Unidirectional; Reverse Standoff Voltage: 6V; Supplier: Mouser; Supplier Part Number: 576-SC3051-04HTG; RoHS: Compliant; Stock: 18024; Pricing: 1=1.59, 10=1.01, 50=1.01, 100=0.666, 1000=0.576, 10000=0.473 (USD); Lifecycle Status: Production; Max Operating Temperature: 125°C; Min Operating Temperature: -40°C; Number of Terminals: 6; REACH SVHC: Yes; ComponentLink1URL: https://datasheet.octopart.com:443/SC3051-04HTG-Littelfuse-datasheet-189913487.pdf?src-supplier=element14+APAC; ComponentLink1Description: https://datasheet.octopart.com:443/SC3051-04HTG-Littelfuse-datasheet-189913487.pdf?src-supplier=element14+APAC
footprint SOT-23-6
pins: 1 I/O 1, 2 GND, 3 I/O 2, 4 I/O 3, 5 VCC, 6 I/O 4

## SD03
designator D?
20A 350W 16V 4V 3.3V SOD-323 ESD and Surge Protection (TVS/ESD) ROHS; Manufacturer: MDD; Manufacturer Part Number: SD03; Package: SOD-323; LCSC Part Number: C502526; Item Type: (TVS/ESD); ComponentLink1Description: LCSC; ComponentLink1URL: https://www.lcsc.com/product-detail/ESD-and-Surge-Protection-TVS-ESD_MDD-Microdiode-Semiconductor-SD03_C502526.html
footprint SOD-323
pins: 1 K, 2 A

## SD12C.TCT
designator D?
24V 350W 13.3V 12V SOD-323 ESD and Surge Protection (TVS/ESD) ROHS; Manufacturer: SEMTECH; Manufacturer Part Number: SD12C.TCT; Item Type: Diode; Package: SOD-323; LCSC Part Number: C85198; ComponentLink1Description: LCSC; ComponentLink1URL: https://www.lcsc.com/product-detail/ESD-and-Surge-Protection-TVS-ESD_SEMTECH-SD12C-TCT_C85198.html?s_z=n_SD12
footprint SOD-323 (Bi-directional)
pins: 1 A, 2 A

## SD12LC
designator D?
TVS DIODE 12VWM 28.6VC SOD323; Manufacturer: Sangdest Microelectronics; Manufacturer Part Number: SD12LC; Supplier: DigiKey; Supplier Part Number: 1655-SD12LCCT-ND; Stock: 575; Pricing: 1=0.43, 10=0.305, 100=0.1541, 500=0.13654, 1000=0.10625 (USD); Item Type: Diode
footprint SOD-323
pins: 1 K, 2 A/K

## SD15C.TCT
designator D?
29V 350W 16.7V 15V SOD-323 ESD and Surge Protection (TVS/ESD) ROHS; Manufacturer: SEMTECH; Manufacturer Part Number: SD15C.TCT; Package: SOD-323; LCSC Part Number: C780130; Item Type: (TVS/ESD); ComponentLink1Description: LCSC; ComponentLink1URL: https://www.lcsc.com/product-detail/ESD-and-Surge-Protection-TVS-ESD_SEMTECH-SD15C-TCT_C780130.html?s_z=n_SD15C.TCT
footprint SOD-323 (Bi-directional)
pins: 1 A, 2 A

## SD15U50SL
designator D?
50V Independent Type 15A 450mV@15A TO-277 Schottky Diodes ROHS; Manufacturer: LGE; Manufacturer Part Number: SD15U50SL; Item Type: Diode; Package: TO-277; LCSC Part Number: C2940159; ComponentLink1Description: LCSC; ComponentLink1URL: https://www.lcsc.com/product-detail/Schottky-Diodes_LGE-SD15U50SL_C2940159.html?s_z=n_SD15U50SL
footprint TO-277
pins: 1 A, 2 K, 3 A